# Altium footprint library chip.PcbLib: 3 footprints
Each footprint in its own frame and in the unit in brackets; x right, y up, seen from the top. Pads: shape width x height; smd on the part's side, far side on the other; paste and mask are expansions set on the pad; w line width, h text height; cw(c..) or ccw(c..) is an arc to the next point about the centre after c.
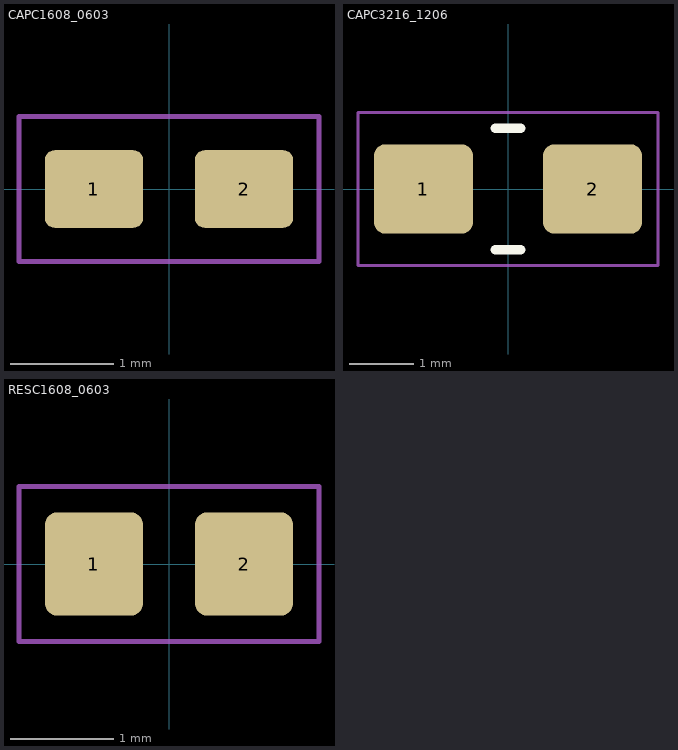
[diagram p0: the footprints below, top view; thin cyan lines are the x and y axes]

## CAPC1608_0603 [mm] "0603 MLCC: Yageo CC0603 / Samsung CL10; land width per Samsung rule"
height 0.9
pads (2):
  rrect25% 0.95x0.75 smd: 1(-0.725,0) 2(0.725,0)
Top Overlay:
  text ".Designator" at 0,0.975 h1
Top Courtyard:
  lines w0.05: -1.45,-0.7 1.45,-0.7 1.45,0.7 -1.45,0.7 -1.45,-0.7
3D body: height 0.9, standoff 0, extent -0.8,-0.45 0.8,0.45

## CAPC3216_1206 [mm] "1206 MLCC: Samsung CL31 / FH 1206; land width per Samsung rule 2/3W<b<W"
height 1.8
pads (2):
  rrect25% 1.55x1.4 smd: 1(-1.325,0) 2(1.325,0)
Top Overlay:
  lines w0.15: -0.2,-0.95 0.2,-0.95 ; -0.2,0.95 0.2,0.95
  text ".Designator" at 0,1.3 h1
Top Courtyard:
  lines w0.05: -2.35,-1.2 -2.35,1.2 2.35,1.2 2.35,-1.2 -2.35,-1.2
3D body: height 1.8, standoff 0, extent -1.6,-0.95 1.6,0.95

## RESC1608_0603 [mm] "0603 chip resistor: UNI-ROYAL 0603WAF / RESI PTFR0603"
height 0.55
pads (2):
  rrect25% 0.95x1 smd: 1(-0.725,0) 2(0.725,0)
Top Overlay:
  text ".Designator" at 0,1.1 h1
Top Courtyard:
  lines w0.05: -1.45,-0.75 -1.45,0.75 1.45,0.75 1.45,-0.75 -1.45,-0.75
3D body: height 0.55, standoff 0, extent -0.8,-0.45 0.8,0.45